# Altium footprint library rus.PcbLib: 72 footprints (part 4 of 5)
Each footprint in its own frame and in the unit in brackets; x right, y up, seen from the top. Pads: shape width x height; smd on the part's side, far side on the other; paste and mask are expansions set on the pad; w line width, h text height; cw(c..) or ccw(c..) is an arc to the next point about the centre after c.
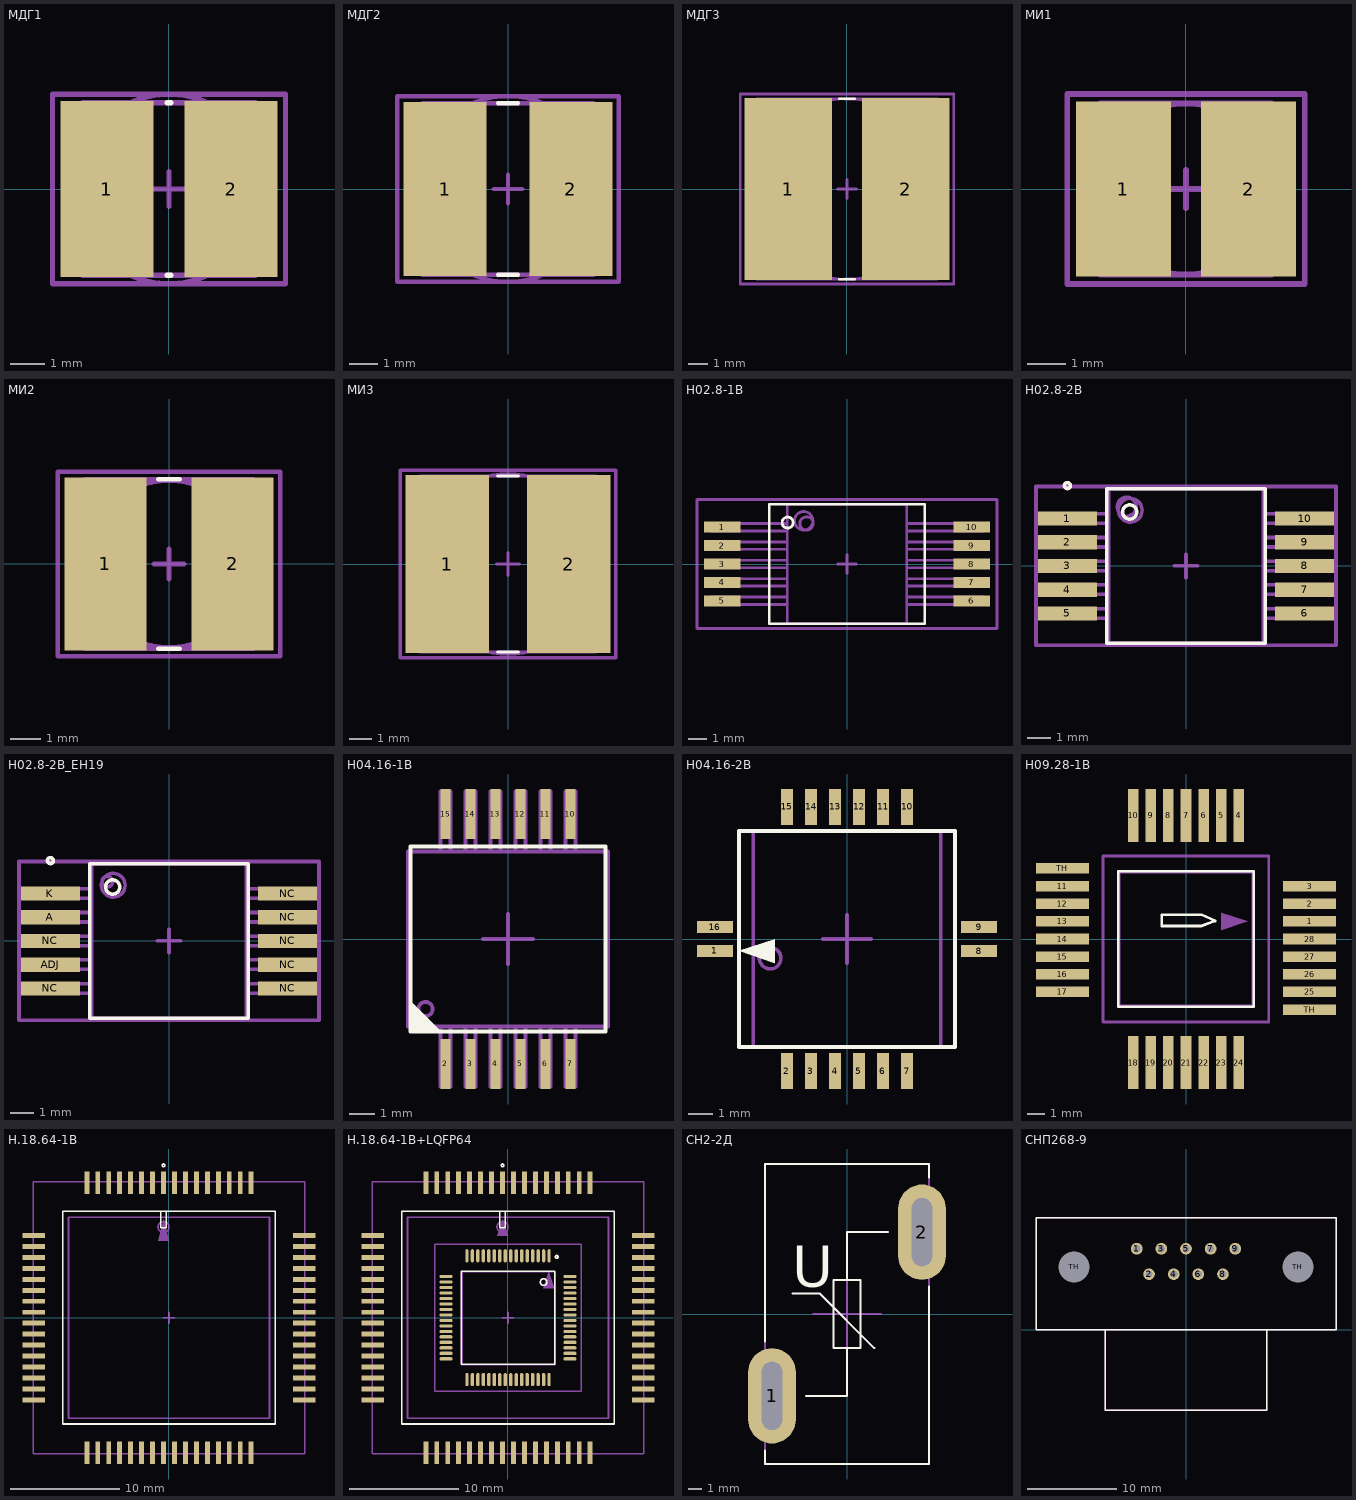
[diagram p3: the footprints below, top view; thin cyan lines are the x and y axes]

## МДГ1 [mm] "МДГ1"
height 4.8
pads (2):
  rect 2.7x5.1 smd: 1(-1.8,0) 2(1.8,0)
Top Overlay:
  lines w0.15: -0.05,-2.5 0.05,-2.5 ; -0.05,2.5 0.05,2.5
Mechanical 13:
  lines w0.15: -2.5,-2.5 2.5,-2.5 2.5,2.5 -2.5,2.5 -2.5,-2.5
Mechanical 15:
  lines w0.15: -0.5,0 0.5,0 ; 0,-0.5 0,0.5 ; -3.375,-2.75 3.375,-2.75 3.375,2.75 -3.375,2.75 -3.375,-2.75
Mechanical 29:
  circle w0.15: c0,0 r2.75
  text ".Designator" at -2.1,-0.3 h1
3D body "INDP5050X48N.step": height 4.9, standoff 0, extent -2.6,-2.5 2.6,2.5

## МДГ2 [mm] "МДГ2"
height 6
pads (2):
  rect 2.9x6.1 smd: 1(-2.2,0) 2(2.2,0)
Top Overlay:
  lines w0.15: -0.35,-3 0.35,-3 ; -0.35,3 0.35,3
Mechanical 13:
  lines w0.15: -3,-3 3,-3 3,3 -3,3 -3,-3
Mechanical 15:
  lines w0.15: -0.5,0 0.5,0 ; 0,-0.5 0,0.5 ; -3.875,-3.25 3.875,-3.25 3.875,3.25 -3.875,3.25 -3.875,-3.25
Mechanical 29:
  circle w0.15: c0,0 r3.25
  text ".Designator" at -2.5,-0.3 h1
3D body "INDP6060X60N.step": height 6.1, standoff 0, extent -3.1,-3 3.1,3

## МДГ3 [mm] "МДГ3"
height 6.3
pads (2):
  rect 4.6x9.6 smd: 1(-3.1,0) 2(3.1,0)
Top Overlay:
  lines w0.15: -0.4,-4.75 0.4,-4.75 ; -0.4,4.75 0.4,4.75
Mechanical 13:
  lines w0.15: -4.75,-4.75 4.75,-4.75 4.75,4.75 -4.75,4.75 -4.75,-4.75
Mechanical 15:
  lines w0.15: -0.5,0 0.5,0 ; 0,-0.5 0,0.5 ; -5.625,-5 5.625,-5 5.625,5 -5.625,5 -5.625,-5
Mechanical 29:
  circle w0.15: c0,0 r4.75
  text ".Designator" at -3.1,-0.4 h1
3D body "INDP9595X63N.step": height 6.4, standoff 0, extent -4.85,-4.75 4.85,4.75

## МИ1 [mm] "МИ1"
height 4.6
pads (2):
  rect 2.5x4.6 smd: 1(-1.65,0) 2(1.65,0)
Mechanical 13:
  lines w0.15: -2.25,-2.25 2.25,-2.25 2.25,2.25 -2.25,2.25 -2.25,-2.25
Mechanical 15:
  lines w0.15: -0.5,0 0.5,0 ; 0,-0.5 0,0.5 ; -3.125,-2.5 3.125,-2.5 3.125,2.5 -3.125,2.5 -3.125,-2.5
Mechanical 29:
  circle w0.15: c0,0 r2.25
  text ".Designator" at -1.9,-0.3 h1
3D body "INDP4545X46N.step": height 4.7, standoff 0, extent -2.35,-2.25 2.35,2.25

## МИ2 [mm] "МИ2"
height 5.8
pads (2):
  rect 2.7x5.7 smd: 1(-2.1,0) 2(2.1,0)
Top Overlay:
  lines w0.15: -0.35,-2.8 0.35,-2.8 ; -0.35,2.8 0.35,2.8
Mechanical 13:
  lines w0.15: -2.8,-2.8 -2.8,2.8 2.8,2.8 2.8,-2.8 -2.8,-2.8
Mechanical 15:
  lines w0.15: -0.5,0 0.5,0 ; 0,-0.5 0,0.5 ; -3.675,-3.05 -3.675,3.05 3.675,3.05 3.675,-3.05 -3.675,-3.05
Mechanical 29:
  circle w0.15: c0,0 r2.75
  text ".Designator" at -2.2,-0.3 h1
3D body "INDP5656X58N.step": height 5.9, standoff 0, extent -2.9,-2.8 2.9,2.8

## МИ3 [mm] "МИ3"
height 5.9
pads (2):
  rect 3.7x7.9 smd: 1(-2.7,0) 2(2.7,0)
Top Overlay:
  lines w0.15: -0.45,-3.9 0.45,-3.9 ; -0.45,3.9 0.45,3.9
Mechanical 13:
  lines w0.15: -3.9,-3.9 3.9,-3.9 3.9,3.9 -3.9,3.9 -3.9,-3.9
Mechanical 15:
  lines w0.15: -0.5,0 0.5,0 ; 0,-0.5 0,0.5 ; -4.775,-4.15 4.775,-4.15 4.775,4.15 -4.775,4.15 -4.775,-4.15
Mechanical 29:
  circle w0.15: c0,0 r4
  text ".Designator" at -3,-0.3 h1
3D body "INDP7878X59N.step": height 6, standoff 0, extent -4,-3.9 4,3.9

## Н02.8-1В [mm] "CFP, 10-Leads, Body 6,50x6,50mm (max), Pitch 1,00mm, IPC Medium Density"
height 3.4
pads (10):
  rect 2x0.6 smd: 1(-6.775,2) 2(-6.775,1) 3(-6.775,0) 4(-6.775,-1) 5(-6.775,-2) 6(6.775,-2) 7(6.775,-1) 8(6.775,0) 9(6.775,1) 10(6.775,2)
Top Overlay:
  circle w0.15: c-3.225,2.25 r0.3
  lines w0.15: -4.225,-3.25 4.225,-3.25 4.225,3.25 -4.225,3.25 -4.225,-3.25
Mechanical 13:
  circle w0.15: c-2.35,2.35 r0.5
Mechanical 15:
  lines w0.15: -0.5,0 0.5,0 ; 0,-0.5 0,0.5 ; -8.15,-3.5 8.15,-3.5 8.15,3.5 -8.15,3.5 -8.15,-3.5
Mechanical 29:
  circle w0.15: c-2.2,2.2 r0.361
  lines w0.15: -7.4,-2.2 -3.25,-2.2 -3.25,-1.8 -7.4,-1.8 -7.4,-2.1 -7.4,-2.2 ; -7.4,-1.2 -3.25,-1.2 -3.25,-0.8 -7.4,-0.8 -7.4,-1.1 -7.4,-1.2 ; -7.4,-0.2 -3.25,-0.2 -3.25,0.2 -7.4,0.2 -7.4,-0.1 -7.4,-0.2 ; -7.4,0.8 -3.25,0.8 -3.25,1.2 -7.4,1.2 -7.4,0.9 -7.4,0.8 ; -7.4,1.8 -7.4,1.9 -7.4,2.2 -3.25,2.2 -3.25,1.8 -7.4,1.8 ; -3.25,-3.25 3.25,-3.25 3.25,3.25 -3.25,3.25 -3.25,-3.25 ; 3.25,-2.2 7.4,-2.2 7.4,-2.1 7.4,-1.8 3.25,-1.8 3.25,-2.2 ; 3.25,-1.2 7.4,-1.2 7.4,-1.1 7.4,-0.8 3.25,-0.8 3.25,-1.2 ; 3.25,-0.2 7.4,-0.2 7.4,-0.1 7.4,0.2 3.25,0.2 3.25,-0.2 ; 3.25,0.8 7.4,0.8 7.4,0.9 7.4,1.2 3.25,1.2 3.25,0.8 ; 3.25,1.8 3.25,2.2 7.4,2.2 7.4,1.9 7.4,1.8 3.25,1.8
  text ".Designator" at -2.8,-0.4 h1
3D body "Н02.8-1В.STEP": height 2.9, standoff 0, extent -7.5,-3.25 7.5,3.25

## Н02.8-2В [mm] "Н02.8-2В"
height 2.9
pads (10):
  rect 2.5x0.6 smd: 1(-5,2) 2(-5,1) 3(-5,0) 4(-5,-1) 5(-5,-2) 6(5,-2) 7(5,-1) 8(5,0) 9(5,1) 10(5,2)
Top Overlay:
  circle w0.15: c-2.375,2.275 r0.3
  circle w0.15: c-5,3.39 r0.125
  lines w0.15: -3.35,-3.25 3.35,-3.25 3.35,3.25 -3.35,3.25 -3.35,-3.25
Mechanical 13:
  circle w0.15: c-2.35,2.35 r0.5
Mechanical 15:
  lines w0.15: -0.5,0 0.5,0 ; 0,-0.5 0,0.5 ; -6.325,-3.35 6.325,-3.35 6.325,3.35 -6.325,3.35 -6.325,-3.35
Mechanical 29:
  circle w0.15: c-2.5,2.5 r0.4
  lines w0.15: -6,-2.2 -6,-2.1 -6,-1.8 -3.25,-1.8 -3.25,-2.2 -6,-2.2 ; -6,-1.2 -6,-1.1 -6,-0.8 -3.25,-0.8 -3.25,-1.2 -6,-1.2 ; -6,-0.2 -6,-0.1 -6,0.2 -3.25,0.2 -3.25,-0.2 -6,-0.2 ; -6,0.8 -6,0.9 -6,1.2 -3.25,1.2 -3.25,0.8 -6,0.8 ; -6,1.8 -3.25,1.8 -3.25,2.2 -6,2.2 -6,1.9 -6,1.8 ; -3.25,-3.25 3.25,-3.25 3.25,3.25 -3.25,3.25 -3.25,-3.25 ; 3.25,-2.2 3.25,-1.8 6,-1.8 6,-2.1 6,-2.2 3.25,-2.2 ; 3.25,-1.2 3.25,-0.8 6,-0.8 6,-1.1 6,-1.2 3.25,-1.2 ; 3.25,-0.2 3.25,0.2 6,0.2 6,-0.1 6,-0.2 3.25,-0.2 ; 3.25,0.8 3.25,1.2 6,1.2 6,0.9 6,0.8 3.25,0.8 ; 3.25,1.8 6,1.8 6,1.9 6,2.2 3.25,2.2 3.25,1.8
  text ".Designator" at -2.8,-0.3 h1
3D body: height 2.9, standoff 0.5, extent -3.25,-3.25 3.25,3.25

## Н02.8-2В_ЕН19 [mm] "Н02.8-2В для Н142ЕН19"
height 2.9
pads (10):
  rect 2.5x0.6 smd: A(-5,1) ADJ(-5,-1) K(-5,2) NC(-5,-2) NC(-5,0) NC(5,-2) NC(5,-1) NC(5,0) NC(5,1) NC(5,2)
Top Overlay:
  circle w0.15: c-2.375,2.275 r0.3
  circle w0.15: c-5,3.39 r0.125
  lines w0.15: -3.35,-3.25 3.35,-3.25 3.35,3.25 -3.35,3.25 -3.35,-3.25
Mechanical 13:
  circle w0.15: c-2.35,2.35 r0.5
Mechanical 15:
  lines w0.15: -0.5,0 0.5,0 ; 0,-0.5 0,0.5 ; -6.325,-3.35 6.325,-3.35 6.325,3.35 -6.325,3.35 -6.325,-3.35
Mechanical 29:
  circle w0.15: c-2.6,2.5 r0.224
  lines w0.15: -6,-2.2 -6,-2.1 -6,-1.8 -3.25,-1.8 -3.25,-2.2 -6,-2.2 ; -6,-1.2 -6,-1.1 -6,-0.8 -3.25,-0.8 -3.25,-1.2 -6,-1.2 ; -6,-0.2 -6,-0.1 -6,0.2 -3.25,0.2 -3.25,-0.2 -6,-0.2 ; -6,0.8 -6,0.9 -6,1.2 -3.25,1.2 -3.25,0.8 -6,0.8 ; -6,1.8 -3.25,1.8 -3.25,2.2 -6,2.2 -6,1.9 -6,1.8 ; -3.25,-3.25 3.25,-3.25 3.25,3.25 -3.25,3.25 -3.25,-3.25 ; 3.25,-2.2 3.25,-1.8 6,-1.8 6,-2.1 6,-2.2 3.25,-2.2 ; 3.25,-1.2 3.25,-0.8 6,-0.8 6,-1.1 6,-1.2 3.25,-1.2 ; 3.25,-0.2 3.25,0.2 6,0.2 6,-0.1 6,-0.2 3.25,-0.2 ; 3.25,0.8 3.25,1.2 6,1.2 6,0.9 6,0.8 3.25,0.8 ; 3.25,1.8 6,1.8 6,1.9 6,2.2 3.25,2.2 3.25,1.8
  text ".Designator" at -2.9,-0.3 h1
3D body: height 2.9, standoff 0.5, extent -3.25,-3.25 3.25,3.25

## Н04.16-1В [mm]
height 3
pads (12):
  rect 0.4x2 smd: 2(-2.5,-5) 3(-1.5,-5) 4(-0.5,-5) 5(0.5,-5) 6(1.5,-5) 7(2.5,-5) 10(2.5,5) 11(1.5,5) 12(0.5,5) 13(-0.5,5) 14(-1.5,5) 15(-2.5,5)
Top Overlay:
  region: -3.9,-2.5 -3.9,-3.7 -2.7,-3.7
  lines w0.15: -3.9,-3.7 3.9,-3.7 3.9,3.7 -3.9,3.7 -3.9,-3.7
Mechanical 15:
  lines w0.15: -1,0 1,0 ; 0,-1 0,1
Mechanical 29:
  circle w0.15: c-3.3,-2.8 r0.283
  lines w0.15: -2.7,-3.5 -2.7,-5.9 -2.3,-5.9 -2.3,-3.5 ; -2.7,3.5 -2.7,5.9 -2.3,5.9 -2.3,3.5 ; -1.7,-3.5 -1.7,-5.9 -1.3,-5.9 -1.3,-3.5 ; -1.7,3.5 -1.7,5.9 -1.3,5.9 -1.3,3.5 ; -0.7,-3.5 -0.7,-5.9 -0.3,-5.9 -0.3,-3.5 ; -0.7,3.5 -0.7,5.9 -0.3,5.9 -0.3,3.5 ; 0.3,-3.5 0.3,-5.9 0.7,-5.9 0.7,-3.5 ; 0.3,3.5 0.3,5.9 0.7,5.9 0.7,3.5 ; 1.3,-3.5 1.3,-5.9 1.7,-5.9 1.7,-3.5 ; 1.3,3.5 1.3,5.9 1.7,5.9 1.7,3.5 ; 2.3,-3.5 2.3,-5.9 2.7,-5.9 2.7,-3.5 ; 2.3,3.5 2.3,5.9 2.7,5.9 2.7,3.5 ; -4,-3.5 4,-3.5 4,3.5 -4,3.5 -4,-3.5
  text ".Designator" at -3.3,-0.3 h1
3D body "Н04.16-1В.STEP": height 2.71, standoff 0, extent -3.9,-5.7 3.9,5.7

## Н04.16-2В [mm]
height 3
pads (16):
  rect 1.5x0.5 smd: 1(-5.5,-0.5) 8(5.5,-0.5) 9(5.5,0.5) 16(-5.5,0.5)
  rect 0.5x1.5 smd: 2(-2.5,-5.5) 3(-1.5,-5.5) 4(-0.5,-5.5) 5(0.5,-5.5) 6(1.5,-5.5) 7(2.5,-5.5) 10(2.5,5.5) 11(1.5,5.5) 12(0.5,5.5) 13(-0.5,5.5) 14(-1.5,5.5) 15(-2.5,5.5)
Top Overlay:
  region: -4.5,-0.5 -3,0 -3,-1
  lines w0.15: -4.5,-4.5 -4.5,4.5 4.5,4.5 4.5,-4.5 -4.5,-4.5
Mechanical 15:
  lines w0.15: -1,0 1,0 ; 0,-1 0,-0.5 0,0.5 0,1
Mechanical 29:
  circle w0.15: c-3.2,-0.8 r0.447
  lines w0.15: -3.9,-4.5 -3.9,4.5 3.9,4.5 3.9,-4.5 -3.9,-4.5
  text ".Designator" at -3,-0.2 h1
3D body "Н04.16-1В.STEP": height 2.71, standoff 0, extent -3.9,-5.7 3.9,5.7

## Н09.28-1В [mm]
height 3
pads (30):
  rect 3x0.6 smd: 1(7,1) 2(7,2) 3(7,3) 11(-7,3) 12(-7,2) 13(-7,1) 14(-7,0) 15(-7,-1) 16(-7,-2) 17(-7,-3) 25(7,-3) 26(7,-2) 27(7,-1) 28(7,0) TH(-7,4) TH(7,-4)
  rect 0.6x3 smd: 4(3,7) 5(2,7) 6(1,7) 7(0,7) 8(-1,7) 9(-2,7) 10(-3,7) 18(-3,-7) 19(-2,-7) 20(-1,-7) 21(0,-7) 22(1,-7) 23(2,-7) 24(3,-7)
Top Overlay:
  lines w0.15: -3.835,-3.835 -3.835,3.835 3.835,3.835 3.835,-3.835 -3.835,-3.835 ; -1.379,0.737 -1.379,1.372 0.882,1.372 1.653,1.023 0.871,0.737 -1.379,0.737
Mechanical 1:
  lines w0.15: -4.7,-4.7 4.699,-4.7 4.699,4.7 -4.7,4.7 -4.7,-4.7
Mechanical 29:
  region: 3.5,1 2,1.5 2,0.5
  lines w0.15: -3.8,-3.8 3.8,-3.8 3.8,3.8 -3.8,3.8 -3.8,-3.8
  text ".Designator" at -3.6,-0.4 h1
3D body "Н09.28-1В.STEP": height 3.85, standoff 0.05, extent -7.7,-7.7 7.7,7.7

## Н.18.64-1В [mm] "CQFP, 64-Leads, Body 23,40x23,40mm, Pitch 1,00mm, IPC Medium Density"
height 3.5
pads (64):
  rect 0.45x2.05 smd: 1(-0.5,12.325) 2(-1.5,12.325) 3(-2.5,12.325) 4(-3.5,12.325) 5(-4.5,12.325) 6(-5.5,12.325) 7(-6.5,12.325) 8(-7.5,12.325) 25(-7.5,-12.325) 26(-6.5,-12.325) 27(-5.5,-12.325) 28(-4.5,-12.325) 29(-3.5,-12.325) 30(-2.5,-12.325) 31(-1.5,-12.325) 32(-0.5,-12.325) 33(0.5,-12.325) 34(1.5,-12.325) 35(2.5,-12.325) 36(3.5,-12.325) 37(4.5,-12.325) 38(5.5,-12.325) 39(6.5,-12.325) 40(7.5,-12.325) 57(7.5,12.325) 58(6.5,12.325) 59(5.5,12.325) 60(4.5,12.325) 61(3.5,12.325) 62(2.5,12.325) 63(1.5,12.325) 64(0.5,12.325)
  rect 2.05x0.45 smd: 9(-12.325,7.5) 10(-12.325,6.5) 11(-12.325,5.5) 12(-12.325,4.5) 13(-12.325,3.5) 14(-12.325,2.5) 15(-12.325,1.5) 16(-12.325,0.5) 17(-12.325,-0.5) 18(-12.325,-1.5) 19(-12.325,-2.5) 20(-12.325,-3.5) 21(-12.325,-4.5) 22(-12.325,-5.5) 23(-12.325,-6.5) 24(-12.325,-7.5) 41(12.325,-7.5) 42(12.325,-6.5) 43(12.325,-5.5) 44(12.325,-4.5) 45(12.325,-3.5) 46(12.325,-2.5) 47(12.325,-1.5) 48(12.325,-0.5) 49(12.325,0.5) 50(12.325,1.5) 51(12.325,2.5) 52(12.325,3.5) 53(12.325,4.5) 54(12.325,5.5) 55(12.325,6.5) 56(12.325,7.5)
Top Overlay:
  circle w0.15: c-0.5,13.9 r0.125
  lines w0.15: -0.75,9.7 -0.75,8.2 -0.25,8.2 -0.25,9.7 ; -9.7,-9.7 -9.7,9.7 9.7,9.7 9.7,-9.7 -9.7,-9.7
Mechanical 13:
  circle w0.15: c-0.5,8.275 r0.5
Mechanical 15:
  lines w0.15: -0.5,0 0.5,0 ; 0,-0.5 0,0.5 ; -12.4,-12.4 -12.4,12.4 12.4,12.4 12.4,-12.4 -12.4,-12.4
Mechanical 29:
  region: -0.5,9 -1,7 0,7
  lines w0.15: -9.175,-9.175 -9.175,9.175 9.175,9.175 9.175,-9.175 -9.175,-9.175
  text ".Designator" at -3.8,-0.4 h1
3D body "Н.18.64-1В.STEP": height 4.11, standoff 0, extent -13.15,-13.15 13.15,13.15

## Н.18.64-1В+LQFP64 [mm] "CQFP, 64-Leads, Body 23,40x23,40mm, Pitch 1,00mm, IPC Medium Density"
height 3.5
pads (128):
  rect 0.45x2.05 smd: 1(-0.5,12.325) 2(-1.5,12.325) 3(-2.5,12.325) 4(-3.5,12.325) 5(-4.5,12.325) 6(-5.5,12.325) 7(-6.5,12.325) 8(-7.5,12.325) 25(-7.5,-12.325) 26(-6.5,-12.325) 27(-5.5,-12.325) 28(-4.5,-12.325) 29(-3.5,-12.325) 30(-2.5,-12.325) 31(-1.5,-12.325) 32(-0.5,-12.325) 33(0.5,-12.325) 34(1.5,-12.325) 35(2.5,-12.325) 36(3.5,-12.325) 37(4.5,-12.325) 38(5.5,-12.325) 39(6.5,-12.325) 40(7.5,-12.325) 57(7.5,12.325) 58(6.5,12.325) 59(5.5,12.325) 60(4.5,12.325) 61(3.5,12.325) 62(2.5,12.325) 63(1.5,12.325) 64(0.5,12.325)
  oval 0.3x1.2 smd: 1(-0.25,5.65) 2(-0.75,5.65) 3(-1.25,5.65) 4(-1.75,5.65) 5(-2.25,5.65) 6(-2.75,5.65) 7(-3.25,5.65) 8(-3.75,5.65) 25(-3.75,-5.65) 26(-3.25,-5.65) 27(-2.75,-5.65) 28(-2.25,-5.65) 29(-1.75,-5.65) 30(-1.25,-5.65) 31(-0.75,-5.65) 32(-0.25,-5.65) 33(0.25,-5.65) 34(0.75,-5.65) 35(1.25,-5.65) 36(1.75,-5.65) 37(2.25,-5.65) 38(2.75,-5.65) 39(3.25,-5.65) 40(3.75,-5.65) 57(3.75,5.65) 58(3.25,5.65) 59(2.75,5.65) 60(2.25,5.65) 61(1.75,5.65) 62(1.25,5.65) 63(0.75,5.65) 64(0.25,5.65)
  rect 2.05x0.45 smd: 9(-12.325,7.5) 10(-12.325,6.5) 11(-12.325,5.5) 12(-12.325,4.5) 13(-12.325,3.5) 14(-12.325,2.5) 15(-12.325,1.5) 16(-12.325,0.5) 17(-12.325,-0.5) 18(-12.325,-1.5) 19(-12.325,-2.5) 20(-12.325,-3.5) 21(-12.325,-4.5) 22(-12.325,-5.5) 23(-12.325,-6.5) 24(-12.325,-7.5) 41(12.325,-7.5) 42(12.325,-6.5) 43(12.325,-5.5) 44(12.325,-4.5) 45(12.325,-3.5) 46(12.325,-2.5) 47(12.325,-1.5) 48(12.325,-0.5) 49(12.325,0.5) 50(12.325,1.5) 51(12.325,2.5) 52(12.325,3.5) 53(12.325,4.5) 54(12.325,5.5) 55(12.325,6.5) 56(12.325,7.5)
  oval 1.2x0.3 smd: 9(-5.65,3.75) 10(-5.65,3.25) 11(-5.65,2.75) 12(-5.65,2.25) 13(-5.65,1.75) 14(-5.65,1.25) 15(-5.65,0.75) 16(-5.65,0.25) 17(-5.65,-0.25) 18(-5.65,-0.75) 19(-5.65,-1.25) 20(-5.65,-1.75) 21(-5.65,-2.25) 22(-5.65,-2.75) 23(-5.65,-3.25) 24(-5.65,-3.75) 41(5.65,-3.75) 42(5.65,-3.25) 43(5.65,-2.75) 44(5.65,-2.25) 45(5.65,-1.75) 46(5.65,-1.25) 47(5.65,-0.75) 48(5.65,-0.25) 49(5.65,0.25) 50(5.65,0.75) 51(5.65,1.25) 52(5.65,1.75) 53(5.65,2.25) 54(5.65,2.75) 55(5.65,3.25) 56(5.65,3.75)
Top Overlay:
  circle w0.15: c-0.5,13.9 r0.125
  circle w0.15: c3.25,3.25 r0.3
  circle w0.15: c4.45,5.55 r0.125
  lines w0.15: -0.75,9.7 -0.75,8.2 -0.25,8.2 -0.25,9.7 ; -9.7,-9.7 9.7,-9.7 9.7,9.7 -9.7,9.7 -9.7,-9.7 ; -4.25,-4.25 -4.25,4.25 4.25,4.25 4.25,-4.25 -4.25,-4.25
Mechanical 13:
  circle w0.15: c-0.5,8.275 r0.5
Mechanical 15:
  lines w0.15: -12.4,-12.4 12.4,-12.4 12.4,12.4 -12.4,12.4 -12.4,-12.4 ; -6.7,-6.7 -6.7,6.7 6.7,6.7 6.7,-6.7 -6.7,-6.7 ; -0.5,0 0.5,0 -0.5,0 ; 0,-0.5 0,0.5 0,-0.5
Mechanical 29:
  region: 3.7,4.2 4.2,2.7 3.2,2.7
  region: -0.5,9 0,7.5 -1,7.5
  lines w0.15: -9.175,-9.175 9.175,-9.175 9.175,9.175 -9.175,9.175 -9.175,-9.175 ; -4.2,-4.3 -4.2,4.2 4.3,4.2 4.3,-4.3 -4.2,-4.3
  text ".Designator" at -3,-0.4 h1
3D body: height 1.5, standoff 0, extent -6,-6 6,6
3D body "Н.18.64-1В.STEP": height 4.11, standoff 0, extent -13.15,-13.15 13.15,13.15

## СН2-2Д [mm]
height 22
pads (2):
  oval 3.5x7 hole 1.5 slot 5 at 90 deg unplated: 1(-5.5,-6) 2(5.5,6)
Top Overlay:
  lines w0.15: -6,-10 -6,-11 6,-11 6,2 ; -6,-2 -6,11 6,11 6,10 ; -4,1.5 -2,1.5 2,-2.5 ; -3,-6 0,-6 0,-2.5 ; 0,2.5 0,6 3,6 ; -1,-2.5 -1,2.5 1,2.5 1,-2.5 -1,-2.5
  text "U" at -4,2 h3
Mechanical 15:
  lines w0.15: -2.5,0 2.5,0 ; 0,-2.5 0,2.5
Mechanical 29:
  lines w0.15: -6,-11 -6,11 6,11 6,-11 -6,-11
  text ".Designator" at -3.4,-0.2 h1
3D body "СН2-2Д.STEP": height 22, standoff -2, extent -6,-11 6,11

## СНП268-9 [mm]
height 15
pads (11):
  round 1.3 hole 0.8: 1(-5.5,9.04) 2(-4.125,6.2) 3(-2.75,9.04) 4(-1.375,6.2) 5(0,9.04) 6(1.375,6.2) 7(2.75,9.04) 8(4.125,6.2) 9(5.5,9.04)
  round 1.3 hole 3.5 unplated: TH(-12.5,7) TH(12.5,7)
Top Overlay:
  lines w0.15: -9,0 -9,-9 9,-9 9,0 ; -16.75,0 0,0 16.75,0 16.75,12.5 -2.5,12.5 -16.75,12.5 -16.75,0
Mechanical 29:
  lines w0.15: -9,0 -9,-9 9,-9 9,0 ; -16.75,0 -16.75,12.5 16.75,12.5 16.75,0 -16.75,0
  text ".Designator" at -3.6,3.5 h1
3D body "DRB-9MB.STEP": height 12.6, standoff -3.2, extent -15.4,-6.5 15.4,14